# Altium footprint library Dlib.PcbLib: 70 footprints (part 1 of 5)
Each footprint in its own frame and in the unit in brackets; x right, y up, seen from the top. Pads: shape width x height; smd on the part's side, far side on the other; paste and mask are expansions set on the pad; w line width, h text height; cw(c..) or ccw(c..) is an arc to the next point about the centre after c.
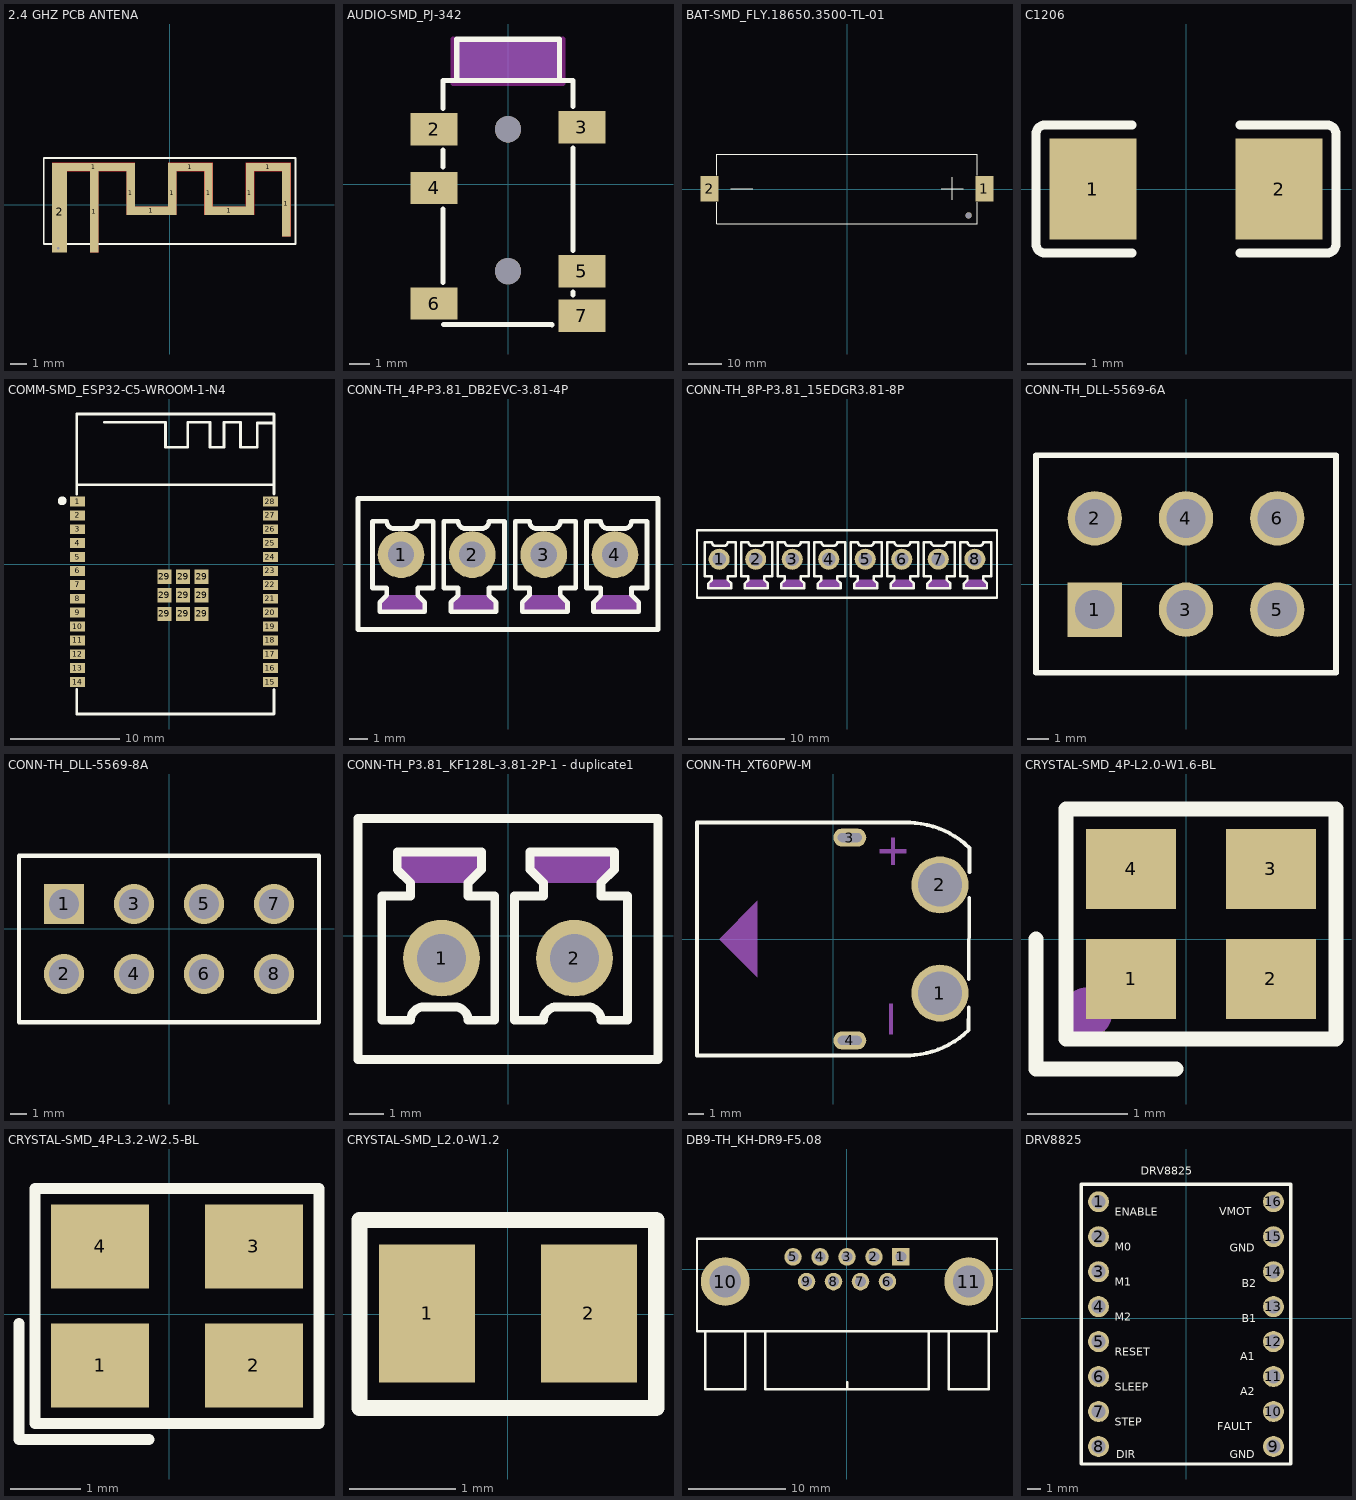
[diagram p0: the footprints below, top view; thin cyan lines are the x and y axes]

## 2.4 GHZ PCB ANTENA [mm]
pads (12):
  rect 5x0.5 smd paste+0.102: 1(-4.6,2.275)
  rect 0.5x4.9 smd paste+0.102: 1(-4.55,-0.425)
  rect 0.5x2.64 smd paste+0.102: 1(-2.35,0.705) 1(0.15,0.705) 1(2.35,0.705) 1(4.85,0.705)
  rect 2x0.5 smd paste+0.102: 1(-1.1,-0.365) 1(3.6,-0.365)
  rect 2.7x0.5 smd paste+0.102: 1(1.25,2.275) 1(5.95,2.275)
  rect 0.5x3.94 smd paste+0.102: 1(7.05,0.055)
  rect 0.9x4.9 smd paste+0.102: 2(-6.65,-0.425)
via -6.719,-2.629 diameter 0.3 hole 0.15
Top Layer:
  region: -2.1,2.025 -2.1,2.525 -7.1,2.525 -7.1,2.025 -4.8,2.025 -4.8,-2.875 -4.3,-2.875 -4.3,2.025 -2.6,2.025 -2.6,-0.615 -2.1,-0.615 -0.1,-0.615 -0.1,-0.115 -2.1,-0.115
  region: 2.6,2.025 2.6,2.525 -0.1,2.525 -0.1,2.025 -0.1,-0.615 0.4,-0.615 0.4,2.025 2.1,2.025 2.1,-0.615 2.6,-0.615 4.6,-0.615 4.6,-0.115 2.6,-0.115
  region: -2.1,2.025 -2.1,2.525 -7.1,2.525 -7.1,2.025 -4.8,2.025 -4.8,-2.875 -4.3,-2.875 -4.3,2.025 -2.6,2.025 -2.6,-0.615 -2.1,-0.615 -0.1,-0.615 -0.1,-0.115 -2.1,-0.115
  region: 2.6,2.025 2.6,2.525 -0.1,2.525 -0.1,2.025 -0.1,-0.615 0.4,-0.615 0.4,2.025 2.1,2.025 2.1,-0.615 2.6,-0.615 4.6,-0.615 4.6,-0.115 2.6,-0.115
  region: 7.3,2.025 7.3,2.525 4.6,2.525 4.6,2.025 4.6,-0.615 5.1,-0.615 5.1,2.025 6.8,2.025 6.8,-1.915 7.3,-1.915
  region: -2.1,2.025 -2.1,2.525 -7.1,2.525 -7.1,2.025 -4.8,2.025 -4.8,-2.875 -4.3,-2.875 -4.3,2.025 -2.6,2.025 -2.6,-0.615 -2.1,-0.615 -0.1,-0.615 -0.1,-0.115 -2.1,-0.115
  region: 2.6,2.025 2.6,2.525 -0.1,2.525 -0.1,2.025 -0.1,-0.615 0.4,-0.615 0.4,2.025 2.1,2.025 2.1,-0.615 2.6,-0.615 4.6,-0.615 4.6,-0.115 2.6,-0.115
  region: 2.6,2.025 2.6,2.525 -0.1,2.525 -0.1,2.025 -0.1,-0.615 0.4,-0.615 0.4,2.025 2.1,2.025 2.1,-0.615 2.6,-0.615 4.6,-0.615 4.6,-0.115 2.6,-0.115
  region: -2.1,2.025 -2.1,2.525 -7.1,2.525 -7.1,2.025 -4.8,2.025 -4.8,-2.875 -4.3,-2.875 -4.3,2.025 -2.6,2.025 -2.6,-0.615 -2.1,-0.615 -0.1,-0.615 -0.1,-0.115 -2.1,-0.115
  region: 7.3,2.025 7.3,2.525 4.6,2.525 4.6,2.025 4.6,-0.615 5.1,-0.615 5.1,2.025 6.8,2.025 6.8,-1.915 7.3,-1.915
  region: 2.6,2.025 2.6,2.525 -0.1,2.525 -0.1,2.025 -0.1,-0.615 0.4,-0.615 0.4,2.025 2.1,2.025 2.1,-0.615 2.6,-0.615 4.6,-0.615 4.6,-0.115 2.6,-0.115
  region: -2.1,2.025 -2.1,2.525 -7.1,2.525 -7.1,2.025 -4.8,2.025 -4.8,-2.875 -4.3,-2.875 -4.3,2.025 -2.6,2.025 -2.6,-0.615 -2.1,-0.615 -0.1,-0.615 -0.1,-0.115 -2.1,-0.115
Top Overlay:
  lines w0.1: -7.6,-2.375 7.6,-2.375 7.6,2.825 -7.6,2.825 -7.6,-2.375

## AUDIO-SMD_PJ-342 [mm]
pads (8):
  rect 2.3x1.6 smd paste+0 mask+0.051: 2(-3.65,2.711) 3(3.65,2.811) 4(-3.65,-0.189) 5(3.65,-4.289) 6(-3.65,-5.889) 7(3.65,-6.489)
  round 1.3 hole 1.3 unplated paste-2539.97: ""(0,-4.289) ""(0,2.711)
Top Overlay:
  lines w0.254: -3.2,-4.857 -3.2,-1.22 ; -3.2,0.843 -3.2,1.68 ; -3.2,3.743 -3.2,5.111 3.2,5.111 3.2,3.843 ; -3.185,-6.921 2.174,-6.921 2.174,-6.934 ; -2.54,5.131 -2.53,5.207 -2.53,7.151 2.54,7.151 2.54,5.111 ; 3.2,-5.457 3.2,-5.32 ; 3.2,-3.257 3.2,1.78
Keep-Out Layer:
  lines w0.254: -2.7,7.162 -2.7,5.062 -2.7,4.962 2.6,4.962 2.7,4.962 2.7,7.162
Mechanical 15:
  circle w0.55: c0,2.711 r0.275
  circle w0.55: c0,-4.289 r0.275
  region: -2.499,7.157 2.506,7.157 2.506,5.134 -2.508,5.134 -2.508,5.162

## BAT-SMD_FLY.18650.3500-TL-01 [mm]
pads (3):
  rect 5.3x7.5 smd paste+0 mask+0.051: 1(40.65,0.064) 2(-40.65,0.064)
  round 1.8 hole 1.8 unplated paste-2539.97: ""(36,-7.787)
Top Overlay:
  lines w0.254: -38.5,-3.918 -38.5,-10.351 38.5,-10.351 38.5,-3.918 ; -38.5,4.045 -38.5,10.351 38.5,10.351 38.5,4.045 ; -34.385,0.064 -27.908,0.064 ; 27.94,0.064 34.417,0.064 ; 31.115,-3.238 31.115,3.492

## C1206 [mm]
pads (2):
  rect 1.485x1.728 smd paste-100 mask+0.051: 1(-1.593,0) 2(1.593,0)
Top Overlay:
  lines w0.152: -0.926,-1.093 -2.411,-1.093 cw(c-2.411,-0.94) -2.564,-0.94 -2.564,0.94 cw(c-2.411,0.94) -2.411,1.093 -0.926,1.093 ; 0.926,-1.093 2.411,-1.093 ccw(c2.411,-0.94) 2.564,-0.94 2.564,0.94 ccw(c2.411,0.94) 2.411,1.093 0.926,1.093
Top Paste:
  region: -0.85,-0.764 -0.85,-0.394 -0.95,-0.294 -1.255,-0.294 -1.355,-0.194 -1.355,0.194 -1.255,0.294 -0.95,0.294 -0.85,0.394 -0.85,0.764 -0.95,0.864 -2.235,0.864 -2.335,0.764 -2.335,-0.764 -2.235,-0.864 -0.95,-0.864
  region: 0.85,-0.764 0.85,-0.394 0.95,-0.294 1.255,-0.294 1.355,-0.194 1.355,0.194 1.255,0.294 0.95,0.294 0.85,0.394 0.85,0.764 0.95,0.864 2.235,0.864 2.335,0.764 2.335,-0.764 2.235,-0.864 0.95,-0.864
3D body "CGA5L2X7R1H474K160AA.STEP": height 1.6, standoff 0, extent -1.6,-0.95 1.6,0.95

## COMM-SMD_ESP32-C5-WROOM-1-N4 [mm]
pads (37):
  rect 1.385x0.9 smd paste+0 mask+0.051: 1(-8.363,5.715) 2(-8.363,4.445) 3(-8.363,3.175) 4(-8.363,1.905) 5(-8.363,0.635) 6(-8.363,-0.635) 7(-8.363,-1.905) 8(-8.363,-3.175) 9(-8.363,-4.445) 10(-8.363,-5.715) 11(-8.363,-6.985) 12(-8.363,-8.255) 13(-8.363,-9.525) 14(-8.363,-10.795) 15(9.272,-10.795) 16(9.272,-9.525) 17(9.272,-8.255) 18(9.272,-6.985) 19(9.272,-5.715) 20(9.272,-4.445) 21(9.272,-3.175) 22(9.272,-1.905) 23(9.272,-0.635) 24(9.272,0.635) 25(9.272,1.905) 26(9.272,3.175) 27(9.272,4.445) 28(9.272,5.715)
  rect 1.3x1.3 smd paste+0 mask+0.05: 29(-0.415,-4.563) 29(-0.415,-1.163) 29(-0.415,-2.863) 29(1.285,-1.163) 29(1.285,-2.863) 29(1.285,-4.563) 29(2.985,-2.863) 29(2.985,-1.163) 29(2.985,-4.563)
Top Overlay:
  circle w0.4: c-9.764,5.773 r0.2
  lines w0.254: -8.436,6.397 -8.436,13.481 -8.436,13.715 9.598,13.715 9.598,6.397 ; -8.436,7.241 9.598,7.241 ; -8.436,-11.476 -8.436,-13.716 9.598,-13.716 9.598,-11.476 ; -8.436,7.216 -8.436,13.716 ; -5.896,12.954 -0.308,12.954 -0.308,10.668 1.724,10.668 1.724,12.954 3.756,12.954 3.756,10.668 5.026,10.668 5.026,12.954 6.55,12.954 6.55,10.668 8.074,10.668 8.074,12.895 9.598,12.895

## CONN-TH_4P-P3.81_DB2EVC-3.81-4P [mm]
pads (4):
  round 2.5 hole 1.4 paste-2539.97 mask+0.05: 1(-5.715,0.5) 2(-1.905,0.5) 3(1.905,0.5) 4(5.715,0.5)
Top Overlay:
  lines w0.254: -8.001,-3.5 -8.001,-1.405 ; -4.064,2.278 -4.826,2.278 cw(c-5.207,2.278) -5.207,1.897 -5.715,1.897 -6.096,1.897 cw(c-6.096,2.278) -6.477,2.278 -7.239,2.278 -7.239,-1.278 -6.477,-1.278 -6.477,-1.659 -6.858,-2.04 -6.858,-2.548 -4.445,-2.548 -4.445,-2.04 -4.826,-1.659 -4.826,-1.278 -4,-1.278 -4,2.278 ; -0.254,2.278 -1.016,2.278 cw(c-1.397,2.278) -1.397,1.897 -1.905,1.897 -2.286,1.897 cw(c-2.286,2.278) -2.667,2.278 -3.429,2.278 -3.429,-1.278 -2.667,-1.278 -2.667,-1.659 -3.048,-2.04 -3.048,-2.548 -0.635,-2.548 -0.635,-2.04 -1.016,-1.659 -1.016,-1.278 -0.19,-1.278 -0.19,2.278 ; 3.556,2.278 2.794,2.278 cw(c2.413,2.278) 2.413,1.897 1.905,1.897 1.524,1.897 cw(c1.524,2.278) 1.143,2.278 0.381,2.278 0.381,-1.278 1.143,-1.278 1.143,-1.659 0.762,-2.04 0.762,-2.548 3.175,-2.548 3.175,-2.04 2.794,-1.659 2.794,-1.278 3.62,-1.278 3.62,2.278 ; 7.366,2.278 6.604,2.278 cw(c6.223,2.278) 6.223,1.897 5.715,1.897 5.334,1.897 cw(c5.334,2.278) 4.953,2.278 4.191,2.278 4.191,-1.278 4.953,-1.278 4.953,-1.659 4.572,-2.04 4.572,-2.548 6.985,-2.548 6.985,-2.04 6.604,-1.659 6.604,-1.278 7.43,-1.278 7.43,2.278 ; 8.001,-3.5 8.001,-1.405 ; -8.015,-3.5 -8.015,3.5 8.015,3.5 8.015,-3.5 -8.015,-3.5
Mechanical 15:
  region: -4.826,-1.659 -4.445,-2.04 -4.445,-2.548 -6.858,-2.548 -6.858,-2.04 -6.477,-1.659
  region: -1.016,-1.659 -0.635,-2.04 -0.635,-2.548 -3.048,-2.548 -3.048,-2.04 -2.667,-1.659
  region: 2.794,-1.659 3.175,-2.04 3.175,-2.548 0.762,-2.548 0.762,-2.04 1.143,-1.659
  region: 6.604,-1.659 6.985,-2.04 6.985,-2.548 4.572,-2.548 4.572,-2.04 4.953,-1.659
3D body "Phoenix Contact 3.step": height 7.25, standoff -3.25, extent -8.315,-3.683 0.695,3.317
3D body "Phoenix Contact 3.step": height 7.25, standoff -3.25, extent -0.695,-3.683 8.315,3.317

## CONN-TH_8P-P3.81_15EDGR3.81-8P [mm]
pads (8):
  round 2.2 hole 1.4 paste-2539.97 mask+0.05: 1(-13.335,0.5) 2(-9.525,0.5) 3(-5.715,0.5) 4(-1.905,0.5) 5(1.905,0.5) 6(5.715,0.5) 7(9.525,0.5) 8(13.335,0.5)
Top Overlay:
  lines w0.254: -11.684,2.278 -12.446,2.278 cw(c-12.827,2.278) -12.827,1.897 -13.335,1.897 -13.716,1.897 cw(c-13.716,2.278) -14.097,2.278 -14.859,2.278 -14.859,-1.278 -14.097,-1.278 -14.097,-1.659 -14.478,-2.04 -14.478,-2.548 -12.065,-2.548 -12.065,-2.04 -12.446,-1.659 -12.446,-1.278 -11.62,-1.278 -11.62,2.278 ; -7.874,2.278 -8.636,2.278 cw(c-9.017,2.278) -9.017,1.897 -9.525,1.897 -9.906,1.897 cw(c-9.906,2.278) -10.287,2.278 -11.049,2.278 -11.049,-1.278 -10.287,-1.278 -10.287,-1.659 -10.668,-2.04 -10.668,-2.548 -8.255,-2.548 -8.255,-2.04 -8.636,-1.659 -8.636,-1.278 -7.81,-1.278 -7.81,2.278 ; -4.064,2.278 -4.826,2.278 cw(c-5.207,2.278) -5.207,1.897 -5.715,1.897 -6.096,1.897 cw(c-6.096,2.278) -6.477,2.278 -7.239,2.278 -7.239,-1.278 -6.477,-1.278 -6.477,-1.659 -6.858,-2.04 -6.858,-2.548 -4.445,-2.548 -4.445,-2.04 -4.826,-1.659 -4.826,-1.278 -4,-1.278 -4,2.278 ; -0.254,2.278 -1.016,2.278 cw(c-1.397,2.278) -1.397,1.897 -1.905,1.897 -2.286,1.897 cw(c-2.286,2.278) -2.667,2.278 -3.429,2.278 -3.429,-1.278 -2.667,-1.278 -2.667,-1.659 -3.048,-2.04 -3.048,-2.548 -0.635,-2.548 -0.635,-2.04 -1.016,-1.659 -1.016,-1.278 -0.19,-1.278 -0.19,2.278 ; 3.556,2.278 2.794,2.278 cw(c2.413,2.278) 2.413,1.897 1.905,1.897 1.524,1.897 cw(c1.524,2.278) 1.143,2.278 0.381,2.278 0.381,-1.278 1.143,-1.278 1.143,-1.659 0.762,-2.04 0.762,-2.548 3.175,-2.548 3.175,-2.04 2.794,-1.659 2.794,-1.278 3.62,-1.278 3.62,2.278 ; 7.366,2.278 6.604,2.278 cw(c6.223,2.278) 6.223,1.897 5.715,1.897 5.334,1.897 cw(c5.334,2.278) 4.953,2.278 4.191,2.278 4.191,-1.278 4.953,-1.278 4.953,-1.659 4.572,-2.04 4.572,-2.548 6.985,-2.548 6.985,-2.04 6.604,-1.659 6.604,-1.278 7.43,-1.278 7.43,2.278 ; 11.176,2.278 10.414,2.278 cw(c10.033,2.278) 10.033,1.897 9.525,1.897 9.144,1.897 cw(c9.144,2.278) 8.763,2.278 8.001,2.278 8.001,-1.278 8.763,-1.278 8.763,-1.659 8.382,-2.04 8.382,-2.548 10.795,-2.548 10.795,-2.04 10.414,-1.659 10.414,-1.278 11.239,-1.278 11.239,2.278 ; 14.986,2.278 14.224,2.278 cw(c13.843,2.278) 13.843,1.897 13.335,1.897 12.954,1.897 cw(c12.954,2.278) 12.573,2.278 11.811,2.278 11.811,-1.278 12.573,-1.278 12.573,-1.659 12.192,-2.04 12.192,-2.548 14.605,-2.548 14.605,-2.04 14.224,-1.659 14.224,-1.278 15.049,-1.278 15.049,2.278 ; -15.65,-3.5 15.65,-3.5 15.65,3.5 -15.65,3.5 -15.65,-3.5
Mechanical 15:
  region: 14.224,-1.659 14.605,-2.04 14.605,-2.548 12.192,-2.548 12.192,-2.04 12.573,-1.659
  region: 10.414,-1.659 10.795,-2.04 10.795,-2.548 8.382,-2.548 8.382,-2.04 8.763,-1.659
  region: 6.604,-1.659 6.985,-2.04 6.985,-2.548 4.572,-2.548 4.572,-2.04 4.953,-1.659
  region: 2.794,-1.659 3.175,-2.04 3.175,-2.548 0.762,-2.548 0.762,-2.04 1.143,-1.659
  region: -1.016,-1.659 -0.635,-2.04 -0.635,-2.548 -3.048,-2.548 -3.048,-2.04 -2.667,-1.659
  region: -4.826,-1.659 -4.445,-2.04 -4.445,-2.548 -6.858,-2.548 -6.858,-2.04 -6.477,-1.659
  region: -8.636,-1.659 -8.255,-2.04 -8.255,-2.548 -10.668,-2.548 -10.668,-2.04 -10.287,-1.659
  region: -12.446,-1.659 -12.065,-2.04 -12.065,-2.548 -14.478,-2.548 -14.478,-2.04 -14.097,-1.659
3D body "Phoenix Contact 3.step": height 7.25, standoff -3.25, extent 6.985,-3.81 15.995,3.19
3D body "Phoenix Contact 3.step": height 7.25, standoff -3.25, extent -0.695,-3.81 8.315,3.19
3D body "Phoenix Contact 3.step": height 7.25, standoff -3.25, extent -8.315,-3.81 0.695,3.19
3D body "Phoenix Contact 3.step": height 7.25, standoff -3.25, extent -15.808,-3.825 -6.798,3.175

## CONN-TH_DLL-5569-6A [mm]
pads (6):
  rect 2.5x2.5 hole 1.8 paste-2539.97 mask+0.05: 1(-4.2,-1.161)
  round 2.5 hole 1.8 paste-2539.97 mask+0.05: 2(-4.2,3.039) 3(0,-1.161) 4(0,3.039) 5(4.2,-1.161) 6(4.2,3.039)
Top Overlay:
  lines w0.254: -6.9,-4.061 -6.9,5.939 6.9,5.938 6.9,-4.061 -6.9,-4.061

## CONN-TH_DLL-5569-8A [mm]
pads (8):
  rect 2.4x2.4 hole 1.8 paste-2539.97 mask+0.05: 1(-6.3,1.489)
  round 2.4 hole 1.8 paste-2539.97 mask+0.05: 2(-6.3,-2.711) 3(-2.1,1.489) 4(-2.1,-2.711) 5(2.1,1.489) 6(2.1,-2.711) 7(6.3,1.489) 8(6.3,-2.711)
Top Overlay:
  lines w0.254: -9,-5.612 9,-5.612 9,4.389 -9,4.389 -9,-5.612

## CONN-TH_P3.81_KF128L-3.81-2P-1 - duplicate1 [mm]
pads (2):
  round 2.2 hole 1.4 paste-2539.97 mask+0.051: 1(-1.905,-0.636) 2(1.905,-0.636)
Top Overlay:
  lines w0.254: -3.62,-2.414 -3.62,1.142 -2.794,1.142 -2.794,1.523 -3.175,1.904 -3.175,2.412 -0.762,2.412 -0.762,1.904 -1.143,1.523 -1.143,1.142 -0.381,1.142 -0.381,-2.414 -1.143,-2.414 ccw(c-1.524,-2.414) -1.524,-2.033 -1.905,-2.033 -2.413,-2.033 ccw(c-2.413,-2.414) -2.794,-2.414 -3.556,-2.414 ; 0.19,-2.414 0.19,1.141 1.016,1.141 1.016,1.522 0.635,1.903 0.635,2.411 3.048,2.411 3.048,1.903 2.667,1.522 2.667,1.141 3.429,1.141 3.429,-2.415 2.667,-2.415 ccw(c2.286,-2.414) 2.286,-2.033 1.905,-2.034 1.397,-2.034 ccw(c1.397,-2.414) 1.016,-2.414 0.254,-2.414 ; -4.3,-3.536 4.3,-3.536 4.3,3.364 -4.3,3.364 -4.3,-3.536
Mechanical 15:
  region: -2.794,1.523 -3.175,1.904 -3.175,2.412 -0.762,2.412 -0.762,1.904 -1.143,1.523
  region: 1.016,1.523 0.635,1.904 0.635,2.412 3.048,2.412 3.048,1.904 2.667,1.523
3D body "Phoenix Contact 3.step": height 7.25, standoff -3.25, extent -4.565,-3.444 4.445,3.556

## CONN-TH_XT60PW-M [mm]
pads (4):
  round 3.8 hole 2.9 paste-2539.97 mask+0.05: 1(7.1,-3.6) 2(7.1,3.6)
  oval 2.2x1.2 hole 0.6 slot 1.6 at 0 deg paste-2539.97 mask+0.05: 3(1.1,6.75) 4(1.1,-6.75)
Top Overlay:
  lines w0.254: 4.989,-7.747 ccw(c4.846,-1.749) 9.017,-6.062 ; 5.037,7.747 cw(c4.894,1.749) 9.065,6.062 9.057,4.441 ; 5.1,-7.75 -9.065,-7.75 -9.065,7.75 5.1,7.75 ; 9.002,-5.994 9.009,-4.544 ; 9.019,-2.676 9.048,2.738
Mechanical 15:
  region: -5.044,2.54 -5.044,-2.54 -7.584,0
  region: 3.846,6.731 4.1,6.731 4.1,5.969 4.862,5.969 4.862,5.715 4.1,5.715 4.1,4.953 3.846,4.953 3.846,5.715 3.084,5.715 3.084,5.969 3.846,5.969
  region: 3.719,-4.318 3.973,-4.318 3.973,-6.35 3.719,-6.35
3D body "XT60PW-M--3DModel-STEP-269445.STEP": height 8.4, standoff -2.55, extent -9.25,-7.75 8.95,7.75

## CRYSTAL-SMD_4P-L2.0-W1.6-BL [mm]
pads (4):
  rect 0.9x0.8 smd paste+0 mask+0.051: 1(-0.55,-0.4) 2(0.85,-0.4) 3(0.85,0.7) 4(-0.55,0.7)
Top Overlay:
  lines w0.152: -1.5,0 -1.5,-1.3 -0.1,-1.3 ; -1.2,-1 -1.2,1.3 1.5,1.3 1.5,-1 -1.2,-1
Mechanical 15:
  circle w0.254: c-0.993,-0.739 r0.127
3D body "C47089358_CRYSTAL-SMD_4P-L2.0-W1.6-BL.step": height 0.45, standoff -0.01, extent -0.873,-0.673 1.177,0.977

## CRYSTAL-SMD_4P-L3.2-W2.5-BL [mm]
pads (4):
  rect 1.4x1.2 smd paste+0 mask+0.051: 1(-0.986,-0.736) 2(1.214,-0.736) 3(1.214,0.964) 4(-0.986,0.964)
Top Overlay:
  lines w0.152: -2.143,-0.136 -2.143,-1.793 -0.286,-1.793 ; -1.914,-1.564 2.143,-1.564 2.143,1.793 -1.914,1.793 -1.914,-1.564
Mechanical 15:
  circle w0.254: c-1.156,-0.775 r0.127

## CRYSTAL-SMD_L2.0-W1.2 [mm]
pads (2):
  rect 0.9x1.3 smd paste+0 mask+0.051: 1(-0.761,0.005) 2(0.763,0.005)
Top Overlay:
  lines w0.152: -1.397,-0.874 -1.397,0.884 1.397,0.884 1.397,-0.884 -1.397,-0.884 -1.396,-0.63

## DB9-TH_KH-DR9-F5.08 [mm]
pads (11):
  rect 1.8x1.8 hole 1.1: 1(5.54,1.27)
  round 1.8 hole 1.1: 2(2.77,1.27) 3(0,1.27) 4(-2.77,1.27) 5(-5.54,1.27) 6(4.155,-1.27) 7(1.385,-1.27) 8(-1.385,-1.27) 9(-4.155,-1.27)
  round 5 hole 3.25: 10(-12.5,-1.27) 11(12.5,-1.27)
Top Overlay:
  lines w0.254: -14.57,-6.35 -14.57,-12.349 -10.46,-12.349 ; -10.43,-12.35 -10.43,-6.35 ; -8.37,-6.35 -8.37,-12.35 8.38,-12.35 8.38,-6.35 ; 0.005,-12.33 0.005,-11.63 ; 10.43,-6.35 10.43,-12.35 14.54,-12.35 ; 14.57,-12.35 14.57,-6.35 ; -15.4,-6.35 -15.4,3.15 15.4,3.15 15.4,-6.35 -15.4,-6.35
3D body "C4943312.step": height 2.45, standoff -13.85, extent -15.4,-13.736 15.4,1.674

## DRV8825 [mil]
pads (16):
  round 60 hole 40 paste-99999 mask+10: 1(-250,332.5) 2(-250,232.5) 3(-250,132.5) 4(-250,32.5) 5(-250,-67.5) 6(-250,-167.5) 7(-250,-267.5) 8(-250,-367.5) 9(250,-367.5) 10(250,-267.5) 11(250,-167.5) 12(250,-67.5) 13(250,32.5) 14(250,132.5) 15(250,232.5) 16(250,332.5)
Top Overlay:
  lines w10: -300,-417.5 300,-417.5 300,382.5 -300,382.5 -300,-417.5
  text "DRV8825" at -130,400.47 h40
  text "ENABLE" at -204,283.5 h40
  text "M0" at -204,183.97 h40
  text "M1" at -204,83.5 h40
  text "M2" at -204,-16.5 h40
  text "RESET" at -204,-116.03 h40
  text "SLEEP" at -204,-216.03 h40
  text "STEP" at -204,-316.03 h40
  text "DIR" at -200,-410 h40
  text "VMOT" at 95,285.47 h40
  text "GND" at 125,180.47 h40
  text "B2" at 160,80 h40
  text "B1" at 160,-20 h40
  text "A1" at 155,-130 h40
  text "A2" at 155,-230 h40
  text "FAULT" at 90,-329.53 h40
  text "GND" at 125,-409.53 h40